# Altium integrated library LNK306DG.IntLib: 1 symbol
Pins are listed as number, name and electrical type; pins without a type are passive.

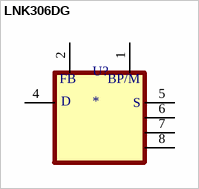
[diagram p0: symbol LNK306DG]

## LNK306DG
designator U?
Converter Offline Buck, Buck-Boost, Flyback Topology 66kHz SO-8C; MF: Power Integrations; MP: LNK306DG; SnapEDA_Link: https://www.snapeda.com/parts/LNK306DG/Power+Integrations/view-part/?ref=snap; Package: SOIC-8 Power Integrations; Value: *; Check_prices: https://www.snapeda.com/parts/LNK306DG/Power+Integrations/view-part/?ref=eda
footprint SO8C
pins: 1, 2, 4, 5 8, 6 8, 7 8, 8
text: FB; BP/M; D; S